# Altium schematic symbol library KJ_Turret.SchLib: 14 symbols
Pins are listed as number, name and electrical type; pins without a type are passive.

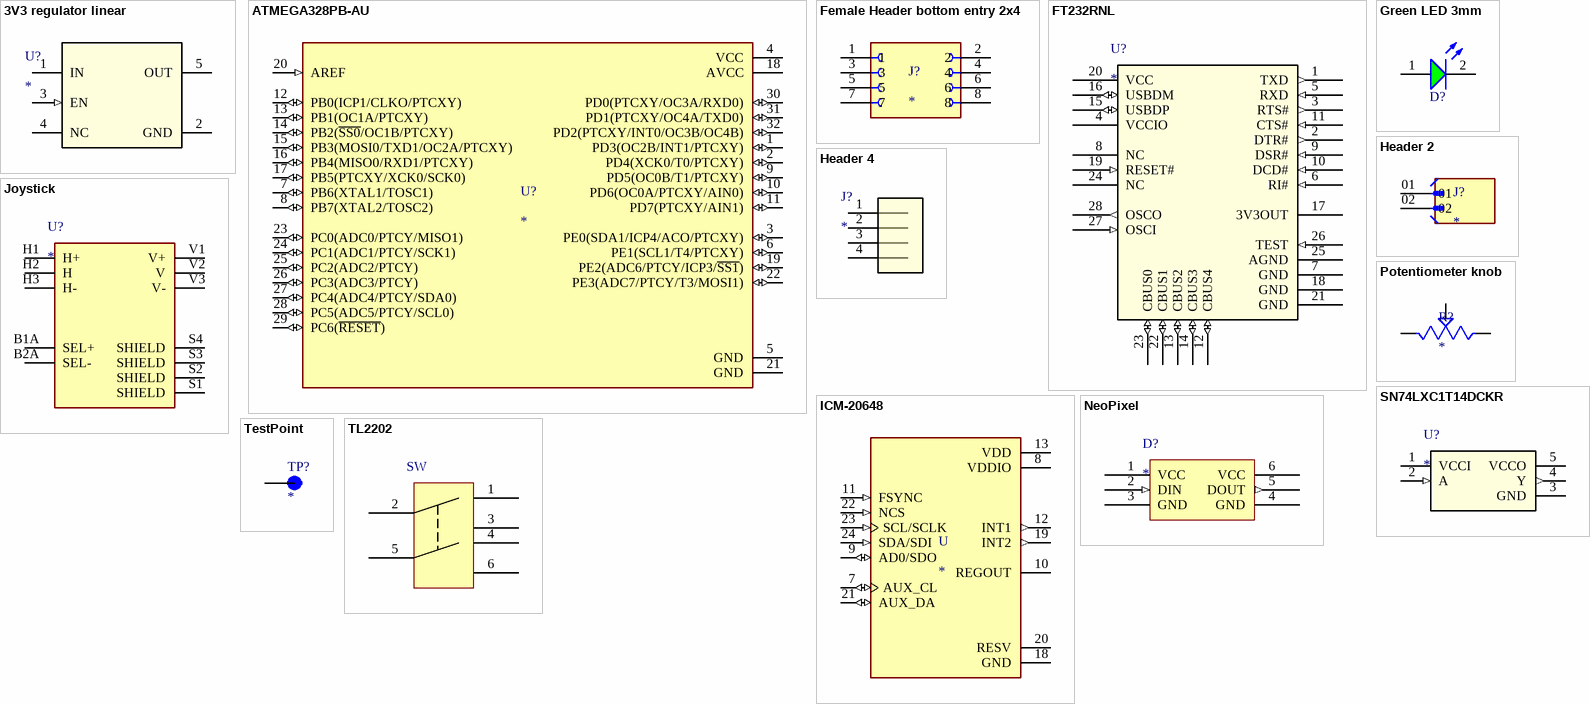
[diagram p0: symbols 3V3 regulator linear to TL2202]

## 3V3 regulator linear
designator U?
No Description Available; Mfr_Name: Texas Instruments; TYPE: TYPE; RefDes: RefDes
footprint DBV0005A-IPC_A
pins: 1 IN (power), 2 GND (power), 3 EN (in), 4 NC, 5 OUT

## ATMEGA328PB-AU
designator U?
MF: Microchip; MP: ATMEGA328PB-AU; SnapEDA_Link: https://www.snapeda.com/parts/ATMEGA328PB-AU/Microchip/view-part/?ref=snap; Package: TQFP-32 Microchip; Value: *; Check_prices: https://www.snapeda.com/parts/ATMEGA328PB-AU/Microchip/view-part/?ref=eda
footprint QFP80P900X900X120-32N
pins: 1 PD3(OC2B/INT1/PTCXY) (io), 2 PD4(XCK0/T0/PTCXY) (io), 3 PE0(SDA1/ICP4/ACO/PTCXY) (io), 4 VCC (power), 5 GND (power), 6 PE1(SCL1/T4/PTCXY) (io), 7 PB6(XTAL1/TOSC1) (io), 8 PB7(XTAL2/TOSC2) (io), 9 PD5(OC0B/T1/PTCXY) (io), 10 PD6(OC0A/PTCXY/AIN0) (io), 11 PD7(PTCXY/AIN1) (io), 12 PB0(ICP1/CLKO/PTCXY) (io), 13 PB1(OC1A/PTCXY) (io), 14 PB2(~{SS0}/OC1B/PTCXY) (io), 15 PB3(MOSI0/TXD1/OC2A/PTCXY) (io), 16 PB4(MISO0/RXD1/PTCXY) (io), 17 PB5(PTCXY/XCK0/SCK0) (io), 18 AVCC (power), 19 PE2(ADC6/PTCY/ICP3/~{SS1}) (io), 20 AREF (in), 21 GND (power), 22 PE3(ADC7/PTCY/T3/MOSI1) (io), 23 PC0(ADC0/PTCY/MISO1) (io), 24 PC1(ADC1/PTCY/SCK1) (io), 25 PC2(ADC2/PTCY) (io), 26 PC3(ADC3/PTCY) (io), 27 PC4(ADC4/PTCY/SDA0) (io), 28 PC5(ADC5/PTCY/SCL0) (io), 29 PC6(~{RESET}) (io), 30 PD0(PTCXY/OC3A/RXD0) (io), 31 PD1(PTCXY/OC4A/TXD0) (io), 32 PD2(PTCXY/INT0/OC3B/OC4B) (io)

## Female Header bottom entry 2x4
designator J?
MF: Amphenol; MP: 71991-306LF; Package: None; Price: None; Check_prices: https://www.snapeda.com/parts/71991-306LF/Amphenol/view-part/?ref=eda; Value: *; SnapEDA_Link: https://www.snapeda.com/parts/71991-306LF/Amphenol/view-part/?ref=snap; Availability: In Stock; Purchase-URL: https://pricing.snapeda.com/search?q=71991-306LF&ref=eda
footprint AMPHENOL_71991-306LF
pins: 1, 2, 3, 4, 5, 6, 7, 8

## FT232RNL
designator U?
Mfr_Name: FTDI, Future Technology Devices International Ltd; RefDes: RefDes; Type: Type
footprint SSOP-28_FTD
pins: 1 TXD (out), 2 DTR# (out), 3 RTS# (out), 4 VCCIO (power), 5 RXD (in), 6 RI# (in), 7 GND (power), 8 NC, 9 DSR# (in), 10 DCD# (in), 11 CTS# (in), 12 CBUS4 (io), 13 CBUS2 (io), 14 CBUS3 (io), 15 USBDP (io), 16 USBDM (io), 17 3V3OUT (power), 18 GND (power), 19 RESET# (in), 20 VCC (power), 21 GND (power), 22 CBUS1 (io), 23 CBUS0 (io), 24 NC, 25 AGND (power), 26 TEST (in), 27 OSCI (in), 28 OSCO (out)

## Green LED 3mm
designator D?, comment Bright Green, 2.2V, 60°  (value not drawn)
Manufacturer Part Number: 151031VS06000; Manufacturer: Wurth Elektronik; Match Code: WL-TMRC; Case/Size Code: 3mm; Chip Technology: GaAsP/GaP; Dominant Wavelength: 568nm; Luminous Intensity: 30mcd; Peak Wavelength: 560nm; Category: Signal LEDs; ComponentLink1Description: Website Link; ComponentLink1URL: https://www.we-online.com/redexpert/article/151031VS06000?ad; ComponentLink2Description: Datasheet Link; ComponentLink2URL: https://www.we-online.com/redexpert/spec/151031VS06000?ad; Mount: Through Hole; Operating Temperature Max: 85°C; Operating Temperature Min: -40°C; Packaging: Bulk; Height: 5.3mm; Diameter: 3.95mm; Emitting Color: Bright Green; Forward Voltage: 2.2V; Viewing Angle: 60°
footprint WL-TMRC_D3.95H5.3
simulation model 3mm_151031VS06000
pins: 1 A, 2 K

## Header 2
designator J?
MP: GRPB021VWVN-RC; Package: None; Availability: Unavailable; Price: None; Value: *
footprint SULLINS_GRPB021VWVN-RC
pins: 01, 02

## Header 4
designator J?
Mfr_Name: Molex Connector Corporation; RefDes: RefDes; Type: Type
footprint CONN_A-6373-04A_MOL
pins: 1, 2, 3, 4

## ICM-20648
designator U
MP: ICM-20648; MF: TDK InvenSense; Package: QFN-24 InvenSense; Price: None; Value: *; SnapEDA_Link: https://www.snapeda.com/parts/ICM-20648/TDK%20InvenSense/view-part/474513/?ref=snap; Availability: Unavailable
footprint QFN40P300X300X95-24N
pins: 7 AUX_CL (io), 8 VDDIO (power), 9 AD0/SDO (io), 10 REGOUT, 11 FSYNC (in), 12 INT1 (out), 13 VDD (power), 18 GND (power), 19 INT2 (out), 20 RESV, 21 AUX_DA (io), 22 NCS (in), 23 SCL/SCLK (in), 24 SDA/SDI (in)

## Joystick
designator U?
MP: COM-09032; Price: None; Availability: Unavailable; Value: *; Package: None
footprint XDCR_COM-09032
pins: B1A SEL+, B2A SEL-, H1 H+, H2 H, H3 H-, S1 SHIELD, S2 SHIELD, S3 SHIELD, S4 SHIELD, V1 V+, V2 V, V3 V-

## NeoPixel
designator D?
footprint NeoPixel
pins: 1 VCC (power), 2 DIN (in), 3 GND (power), 4 GND (power), 5 DOUT (out), 6 VCC (power)

## Potentiometer knob
designator R?
MP: PT01-D120K2-B103; Value: *; Availability: Unavailable; Package: None; Price: None
footprint TRIM_PT01-D120K2-B103
pins: 1, 2, 3

## SN74LXC1T14DCKR
designator U?
Mfr_Name: Texas Instruments; TYPE: TYPE; RefDes: RefDes
footprint DCK0005A-IPC_A
pins: 1 VCCI (power), 2 A (in), 3 GND (power), 4 Y (out), 5 VCCO (power)

## TestPoint
designator TP?
MF: Keystone Electronics Corp.; MP: 5006; SnapEDA_Link: https://www.snapeda.com/parts/5006/Keystone/view-part/?ref=snap; Package: NON STANDARD-1 Keystone; Value: *; Check_prices: https://www.snapeda.com/parts/5006/Keystone/view-part/?ref=eda
footprint KEYSTONE_5006
pins: TP

## TL2202
designator SW
pins: 1, 2, 3, 4, 5, 6